# Altium footprint library 100µF_50V，低阻、105℃、直插_EEUFR1H101.PcbLib: 1 footprints
Each footprint in its own frame and in the unit in brackets; x right, y up, seen from the top. Pads: shape width x height; smd on the part's side, far side on the other; paste and mask are expansions set on the pad; w line width, h text height; cw(c..) or ccw(c..) is an arc to the next point about the centre after c.
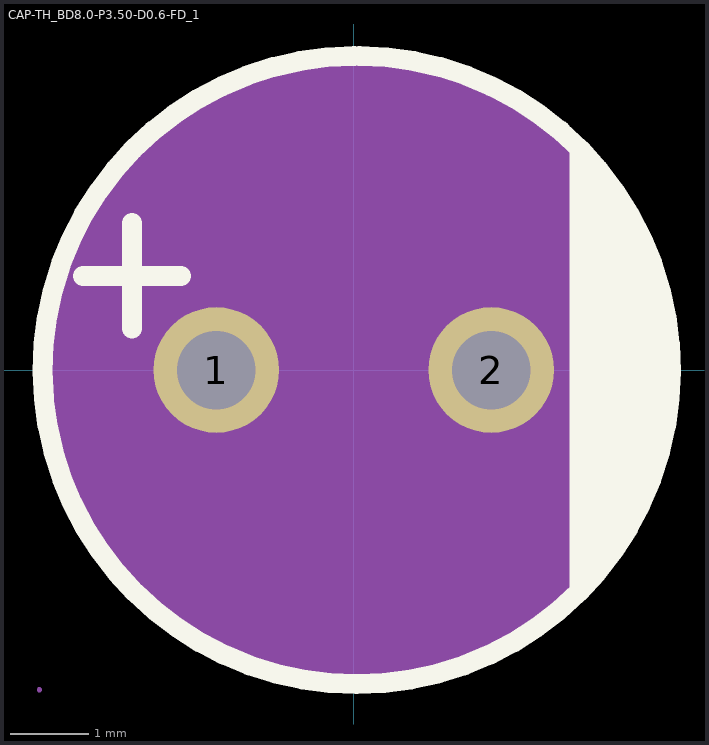
[diagram p0: the footprint, top view; thin cyan lines are the x and y axes]

## CAP-TH_BD8.0-P3.50-D0.6-FD_1 [mm]
pads (2):
  round 1.6 hole 1 paste-2539.97 mask+0.051: 1(-1.75,0) 2(1.75,0)
Top Overlay:
  region: 2.75,-3 2.941,-2.785 3.118,-2.558 3.28,-2.32 3.425,-2.071 3.554,-1.814 3.665,-1.549 3.758,-1.276 3.834,-0.999 3.891,-0.716 3.928,-0.431 3.948,-0.144 3.948,0.144 3.928,0.431 3.891,0.716 3.834,0.999 3.758,1.276 3.665,1.548 3.554,1.814 3.425,2.071 3.28,2.32 3.118,2.558 2.941,2.785 2.75,3 2.75,-3
  lines w0.254: -3.445,1.2 -2.2,1.2 ; -2.822,0.527 -2.822,1.873 ; 0.002,4 ccw(c0.038,0.001) 0.074,4
Mechanical 5:
  region: -3.2,0.5 -3.2,-0.9 -2.8,-0.9 -2.8,0.7 -2.8,0.9 -3.2,0.9
  region: -2.5,0.2 -3.9,0.2 -3.9,-0.2 -2.3,-0.2 -2.1,-0.2 -2.1,0.2
  region: 3.5,0.2 2.1,0.2 2.1,-0.2 3.7,-0.2 3.9,-0.2 3.9,0.2
Mechanical 9:
  region: 0,-4.072 0.282,-4.062 0.563,-4.032 0.841,-3.982 1.114,-3.913 1.383,-3.825 1.644,-3.718 1.897,-3.593 2.141,-3.45 2.374,-3.29 2.595,-3.115 2.803,-2.924 2.997,-2.719 3.176,-2.501 3.34,-2.271 3.487,-2.03 3.616,-1.779 3.728,-1.52 3.82,-1.253 3.894,-0.98 3.949,-0.703 3.983,-0.423 3.998,-0.141 3.993,0.141 3.968,0.422 3.924,0.701 3.859,0.976 3.776,1.246 3.674,1.509 3.553,1.764 3.415,2.01 3.259,2.246 3.088,2.47 2.901,2.682 2.7,2.88 2.485,3.063 2.257,3.23 2.019,3.381 1.77,3.515 1.513,3.631 1.248,3.729 0.977,3.808 0.701,3.867 0.421,3.907 0.14,3.926 -0.143,3.926 -0.424,3.907 -0.704,3.867 -0.98,3.808 -1.251,3.729 -1.516,3.631 -1.773,3.515 -2.022,3.381 -2.26,3.23 -2.487,3.063 -2.702,2.88 -2.904,2.682 -3.091,2.47 -3.262,2.246 -3.418,2.01 -3.556,1.764 -3.676,1.509 -3.779,1.246 -3.862,0.976 -3.926,0.701 -3.971,0.422 -3.996,0.141 -4.001,-0.141 -3.986,-0.423 -3.951,-0.703 -3.897,-0.98 -3.823,-1.253 -3.73,-1.52 -3.619,-1.779 -3.489,-2.03 -3.343,-2.271 -3.179,-2.501 -3,-2.719 -2.806,-2.924 -2.597,-3.115 -2.376,-3.29 -2.143,-3.45 -1.9,-3.593 -1.647,-3.718 -1.385,-3.825 -1.117,-3.913 -0.843,-3.982 -0.566,-4.032 -0.285,-4.062 -0.003,-4.072 0,-4.072
Mechanical 10:
  region: -1.6,0 -1.6,-0.062 -1.688,-0.15 -1.812,-0.15 -1.9,-0.062 -1.9,0 -1.9,0.062 -1.812,0.15 -1.688,0.15 -1.6,0.062 -1.6,0
  region: 1.9,0 1.9,-0.062 1.812,-0.15 1.688,-0.15 1.6,-0.062 1.6,0 1.6,0.062 1.688,0.15 1.812,0.15 1.9,0.062 1.9,0
Mechanical 11:
  region: -3.971,-4.072 -3.971,-4.084 -3.989,-4.102 -4.014,-4.102 -4.031,-4.084 -4.031,-4.072 -4.031,-4.059 -4.014,-4.042 -3.989,-4.042 -3.971,-4.059 -3.971,-4.072